# Altium footprint library PCB1.PcbLib: 48 footprints (part 2 of 3)
Each footprint in its own frame and in the unit in brackets; x right, y up, seen from the top. Pads: shape width x height; smd on the part's side, far side on the other; paste and mask are expansions set on the pad; w line width, h text height; cw(c..) or ccw(c..) is an arc to the next point about the centre after c.
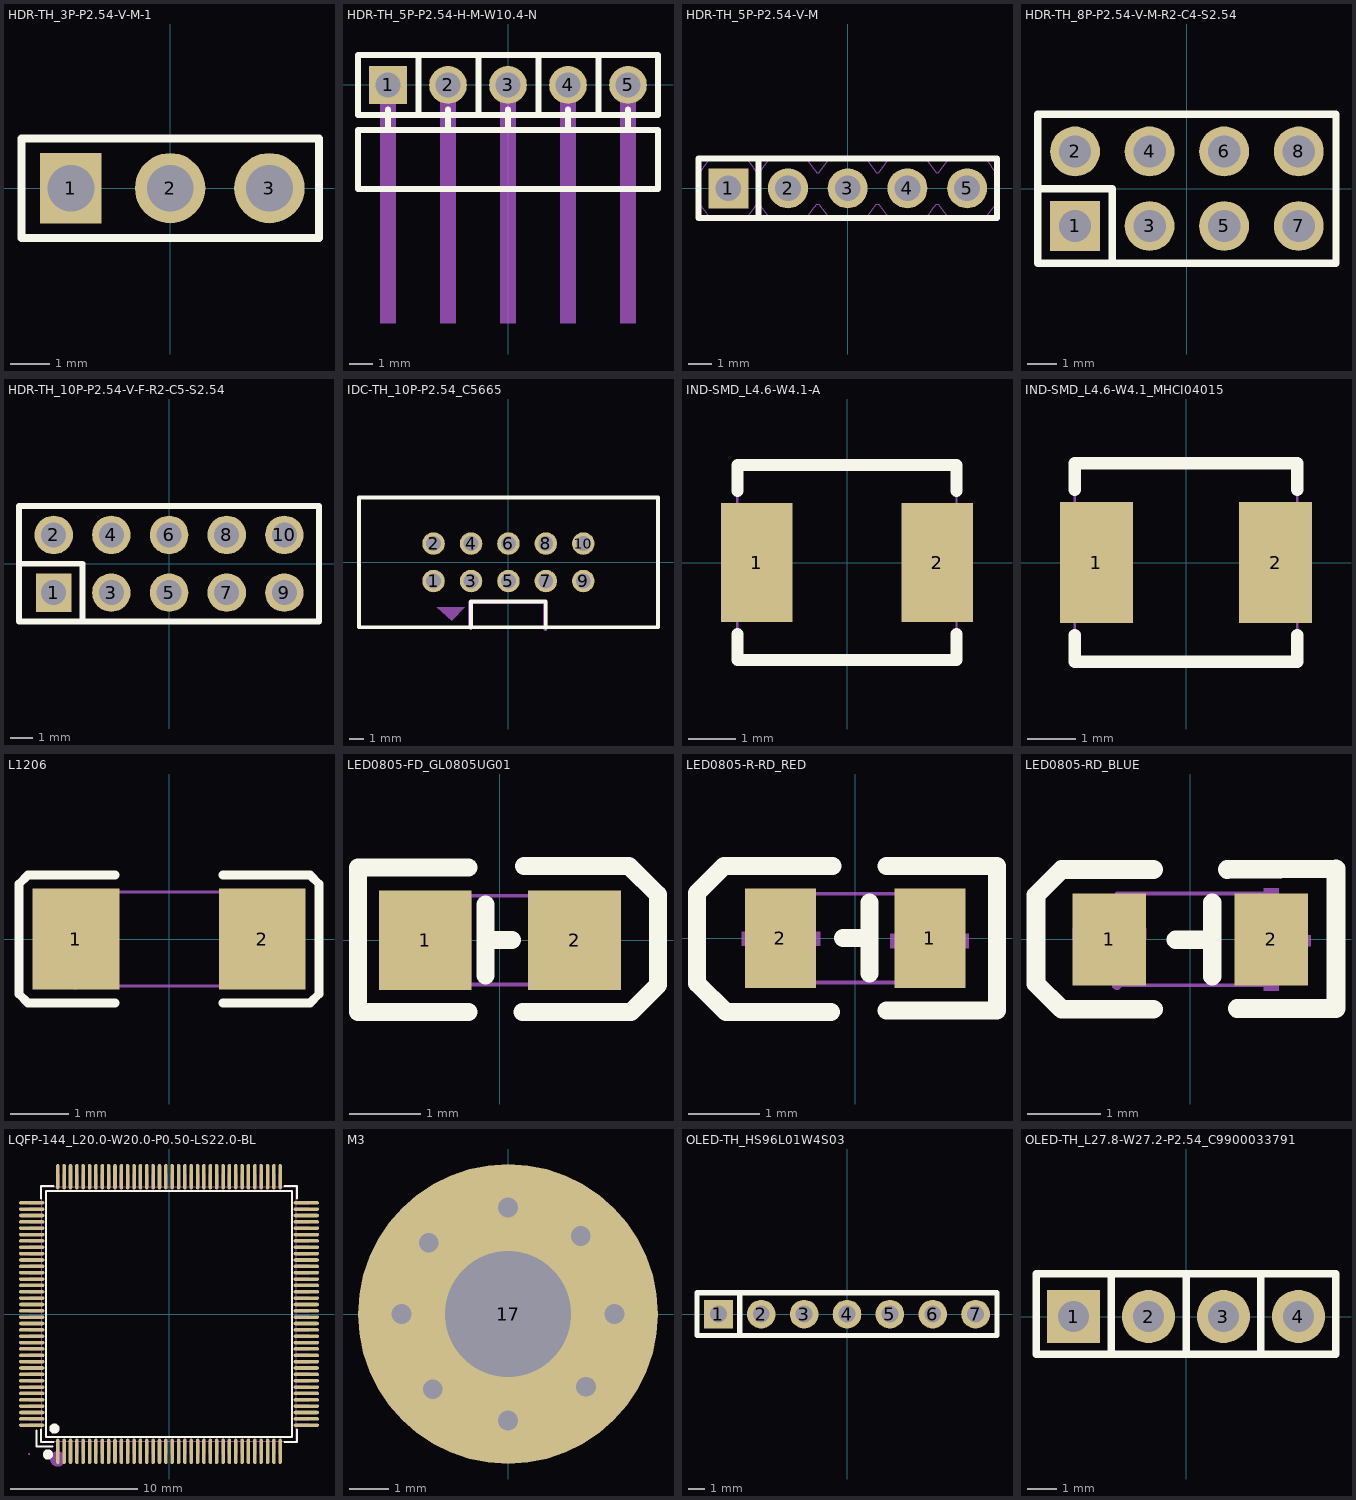
[diagram p1: the footprints below, top view; thin cyan lines are the x and y axes]

## HDR-TH_3P-P2.54-V-M-1 [mil]
pads (3):
  rect 62x70.9 hole 47.2: 1(-100,0)
  round 70.9 hole 47.2: 2(0,0) 3(100,0)
Top Overlay:
  lines w8: -150,-50 150,-50 150,50 -75,50 -150,50 -150,-50
Mechanical 7:
  lines w2: -150,-49.2 150,-49.2 150,49.3 -150,49.3 -150,-49.2
Mechanical 8:
  region: -147.6,-49.2 -147.6,-50.19 -149.01,-51.6 -150.99,-51.6 -152.4,-50.19 -152.4,-49.2 -152.4,-48.21 -150.99,-46.8 -149.01,-46.8 -147.6,-48.21 -147.6,-49.2
Mechanical 9:
  region: -112.6,12.6 -87.4,12.6 -87.4,-12.6 -112.6,-12.6
  region: -12.6,12.6 12.6,12.6 12.6,-12.6 -12.6,-12.6
  region: 87.4,12.6 112.6,12.6 112.6,-12.6 87.4,-12.6

## HDR-TH_5P-P2.54-H-M-W10.4-N [mil]
pads (5):
  rect 63x63 hole 41.3: 1(-200,0)
  round 63 hole 41.3: 2(-100,0) 3(0,0) 4(100,0) 5(200,0)
Top Overlay:
  lines w10: -199.6,-70.1 -199.6,-40.6 ; -149.1,-50 -149.1,50 ; -99.6,-70.1 -99.6,-40.6 ; -49.1,-50 -49.1,50 ; 0.4,-70.1 0.4,-40.6 ; 50.9,-50 50.9,50 ; 100.4,-70.1 100.4,-40.6 ; 150.9,-50 150.9,50 ; 200.4,-70.1 200.4,-40.6 ; -250,-173.2 -250,-74.8 250,-74.8 250,-173.2 -250,-173.2 ; -250,-50 -250,50 250,50 250,-50 -250,-50
Mechanical 6:
  region: -203.5,-176.4 -195.6,-176.4 -195.6,-396.8 -203.5,-396.8
  region: -103.5,-176.4 -95.6,-176.4 -95.6,-396.8 -103.5,-396.8
  region: -3.5,-176.4 4.4,-176.4 4.4,-396.8 -3.5,-396.8
  region: 96.5,-176.4 104.4,-176.4 104.4,-396.8 96.5,-396.8
  region: 196.5,-176.4 204.4,-176.4 204.4,-396.8 196.5,-396.8
Mechanical 9:
  region: -212.6,12.6 -187.4,12.6 -187.4,-12.6 -212.6,-12.6
  region: -112.6,12.6 -87.4,12.6 -87.4,-12.6 -112.6,-12.6
  region: -12.6,12.6 12.6,12.6 12.6,-12.6 -12.6,-12.6
  region: 87.4,12.6 112.6,12.6 112.6,-12.6 87.4,-12.6
  region: 187.4,12.6 212.6,12.6 212.6,-12.6 187.4,-12.6
Mechanical 10:
  region: -212.6,12.6 -187.4,12.6 -187.4,-396.8 -212.6,-396.8
  region: -112.6,12.6 -87.4,12.6 -87.4,-396.8 -112.6,-396.8
  region: -12.6,12.6 12.6,12.6 12.6,-396.8 -12.6,-396.8
  region: 87.4,12.6 112.6,12.6 112.6,-396.8 87.4,-396.8
  region: 187.4,12.6 212.6,12.6 212.6,-396.8 187.4,-396.8

## HDR-TH_5P-P2.54-V-M [mil]
pads (5):
  rect 66.9x66.9 hole 43.3: 1(-200,0)
  round 66.9 hole 43.3: 2(-100,0) 3(0,0) 4(100,0) 5(200,0)
Top Overlay:
  lines w10: -149.1,-50 -149.1,50 ; -250,-50 250,-50 250,50 -250,50 -250,-50
Mechanical 7:
  lines w2: -250,-26.3 -248.1,-26.3 -230.4,-49.9 -169.7,-49.9 -160.5,-38 -152,-26.3 -148.1,-26.3 -130.4,-50 -69.7,-50 -60.7,-38.2 -59.2,-36.1 -52,-26.3 -48.1,-26.3 -30.4,-49.9 30.3,-49.9 39,-38.5 40.1,-37 48,-26.3 51.9,-26.3 69.7,-50 130.3,-50 138.1,-39.7 139.5,-37.9 141,-35.9 148,-26.3 151.9,-26.3 169.6,-50 230.3,-50 239.1,-38.4 248,-26.3 250,-26.3 250,26.4 248,26.4 240.6,36.5 239.3,38.3 230.3,50.1 169.7,50 151.9,26.4 148,26.4 139.1,38.6 136.1,42.4 130.3,50 69.7,50 51.9,26.4 48,26.4 44.7,30.9 43.6,32.4 39.7,37.6 34.1,45 30.3,50 -30.3,50 -48.1,26.4 -52,26.4 -55.8,31.6 -56.6,32.6 -57.5,33.9 -60.9,38.5 -64.2,42.9 -69.7,50 -130.4,50 -148.1,26.4 -152,26.4 -158.2,34.8 -159.4,36.5 -163.4,41.7 -169.7,50 -230.3,50 -237.4,40.7 -248,26.4 -250,26.4 -250,-26.3
Mechanical 8:
  region: -247.6,-50 -247.6,-50.99 -249.01,-52.4 -250.99,-52.4 -252.4,-50.99 -252.4,-50 -252.4,-49.01 -250.99,-47.6 -249.01,-47.6 -247.6,-49.01 -247.6,-50 -247.7,-50
Mechanical 9:
  region: 187.4,12.6 212.6,12.6 212.6,-12.6 187.4,-12.6
  region: 87.4,12.6 112.6,12.6 112.6,-12.6 87.4,-12.6
  region: -12.6,12.6 12.6,12.6 12.6,-12.6 -12.6,-12.6
  region: -112.6,12.6 -87.4,12.6 -87.4,-12.6 -112.6,-12.6
  region: -212.6,12.6 -187.4,12.6 -187.4,-12.6 -212.6,-12.6

## HDR-TH_8P-P2.54-V-M-R2-C4-S2.54 [mil]
pads (8):
  rect 66.9x66.9 hole 43.3: 1(-150,-50)
  round 66.9 hole 43.3: 2(-150,50) 3(-50,-50) 4(-50,50) 5(50,-50) 6(50,50) 7(150,-50) 8(150,50)
Top Overlay:
  lines w10: -200,0 -100,0 -100,-100 ; 199.6,100 -200,100 -200,-100 200,-100 200,100
Mechanical 7:
  lines w2: -200,-98.4 200,-98.4 200,98.5 -200,98.5 -200,-98.4
Mechanical 8:
  region: -197.6,-98.4 -197.6,-99.39 -199.01,-100.8 -200.99,-100.8 -202.4,-99.39 -202.4,-98.4 -202.4,-97.41 -200.99,-96 -199.01,-96 -197.6,-97.41 -197.6,-98.4 -197.7,-98.4
Mechanical 9:
  region: -162.6,-37.4 -137.4,-37.4 -137.4,-62.6 -162.6,-62.6
  region: -162.6,62.6 -137.4,62.6 -137.4,37.4 -162.6,37.4
  region: -62.6,-37.4 -37.4,-37.4 -37.4,-62.6 -62.6,-62.6
  region: -62.6,62.6 -37.4,62.6 -37.4,37.4 -62.6,37.4
  region: 37.4,-37.4 62.6,-37.4 62.6,-62.6 37.4,-62.6
  region: 37.4,62.6 62.6,62.6 62.6,37.4 37.4,37.4
  region: 137.4,-37.4 162.6,-37.4 162.6,-62.6 137.4,-62.6
  region: 137.4,62.6 162.6,62.6 162.6,37.4 137.4,37.4

## HDR-TH_10P-P2.54-V-F-R2-C5-S2.54 [mil]
pads (10):
  rect 62x66.9 hole 43.3: 1(-200,-50)
  round 66.9 hole 43.3: 2(-200,50) 3(-100,-50) 4(-100,50) 5(0,-50) 6(0,50) 7(100,-50) 8(100,50) 9(200,-50) 10(200,50)
Top Overlay:
  lines w10: -260,-100 260,-100 260,100 -260,100 -260,-100 ; -260,-100 -150,-100 -150,0 -260,0 -260,-100
Mechanical 7:
  lines w2: -257.8,-98.4 -257.8,98.4 257.9,98.4 257.9,-98.4 -257.8,-98.4
Mechanical 8:
  region: -255.4,-98.4 -255.4,-99.39 -256.81,-100.8 -258.79,-100.8 -260.2,-99.39 -260.2,-98.4 -260.2,-97.41 -258.79,-96 -256.81,-96 -255.4,-97.41 -255.4,-98.4 -255.5,-98.4
Mechanical 9:
  region: -212.6,-57.9 -212.6,-42.1 -187.4,-42.1 -187.4,-57.9
  region: -212.6,57.9 -187.4,57.9 -187.4,42.1 -212.6,42.1
  region: -112.6,-42.1 -87.4,-42.1 -87.4,-57.9 -112.6,-57.9
  region: -112.6,57.9 -87.4,57.9 -87.4,42.1 -112.6,42.1
  region: -12.6,-42.1 12.6,-42.1 12.6,-57.9 -12.6,-57.9
  region: -12.6,57.9 12.6,57.9 12.6,42.1 -12.6,42.1
  region: 87.4,-42.1 112.6,-42.1 112.6,-57.9 87.4,-57.9
  region: 87.4,57.9 112.6,57.9 112.6,42.1 87.4,42.1
  region: 187.4,-42.1 212.6,-42.1 212.6,-57.9 187.4,-57.9
  region: 187.4,57.9 212.6,57.9 212.6,42.1 187.4,42.1

## IDC-TH_10P-P2.54_C5665 [mil]
pads (10):
  round 60 hole 39.4 paste-99999 mask+2: 1(-200,-50) 2(-200,50) 3(-100,-50) 4(-100,50) 5(0,-50) 6(0,50) 7(100,-50) 8(100,50) 9(200,-50) 10(200,50)
Top Overlay:
  lines w10: -98,-172 -100,-175 -100,-105 100,-105 100,-174 100,-172 ; -399.6,-173.2 -399.6,173.2 399.6,173.2 399.6,-173.2 -399.6,-173.2
Mechanical 6:
  region: -107.4,-173.2 -107.4,-106.3 -107.4,-105.31 -106.64,-103.47 -105.23,-102.06 -103.39,-101.3 -102.4,-101.3 98.4,-101.3 99.39,-101.3 101.23,-102.06 102.64,-103.47 103.4,-105.31 103.4,-106.3 103.4,-177.2 103.4,-179.27 100.47,-182.2 96.33,-182.2 93.4,-179.27 93.4,-177.2 93.4,-111.3 -97.4,-111.3 -97.4,-173.2 -97.4,-175.27 -100.33,-178.2 -104.47,-178.2 -107.4,-175.27 -107.4,-173.2
  region: -191,-120.1 -116.1,-120.1 -151.6,-155.5
Mechanical 7:
  lines w2: -399.6,-173.2 399.6,-173.2 399.6,173.2 -399.6,173.2 -399.6,-173.2
Mechanical 8:
  region: -397.2,-173.2 -397.2,-174.19 -398.61,-175.6 -400.59,-175.6 -402,-174.19 -402,-173.2 -402,-172.21 -400.59,-170.8 -398.61,-170.8 -397.2,-172.21 -397.2,-173.2
Mechanical 9:
  region: -212.6,-37.4 -187.4,-37.4 -187.4,-62.6 -212.6,-62.6
  region: -212.6,62.6 -187.4,62.6 -187.4,37.4 -212.6,37.4
  region: -112.6,-37.4 -87.4,-37.4 -87.4,-62.6 -112.6,-62.6
  region: -112.6,62.6 -87.4,62.6 -87.4,37.4 -112.6,37.4
  region: -12.6,-37.4 12.6,-37.4 12.6,-62.6 -12.6,-62.6
  region: -12.6,62.6 12.6,62.6 12.6,37.4 -12.6,37.4
  region: 87.4,-37.4 112.6,-37.4 112.6,-62.6 87.4,-62.6
  region: 87.4,62.6 112.6,62.6 112.6,37.4 87.4,37.4
  region: 187.4,-37.4 212.6,-37.4 212.6,-62.6 187.4,-62.6
  region: 187.4,62.6 212.6,62.6 212.6,37.4 187.4,37.4

## IND-SMD_L4.6-W4.1-A [mil]
pads (2):
  rect 59.1x98.4 smd: 1(-74.8,0) 2(74.8,0)
Top Overlay:
  lines w10: -90.6,-59.1 -90.6,-80.7 90.5,-80.7 90.5,-59.1 ; -90.6,59 -90.6,80.7 90.5,80.7 90.5,59.1
Mechanical 7:
  lines w2: -90.6,-80.7 90.5,-80.7 90.5,80.7 -90.6,80.7 -90.6,-80.7
Mechanical 8:
  region: -88.2,-80.7 -88.2,-81.69 -89.61,-83.1 -91.59,-83.1 -93,-81.69 -93,-80.7 -93,-79.71 -91.59,-78.3 -89.61,-78.3 -88.2,-79.71 -88.2,-80.7
Mechanical 9:
  region: 90.5,29.5 90.5,-29.5 51.2,-29.5 51.2,29.5
  region: -51.2,29.5 -51.2,-29.5 -90.6,-29.5 -90.6,29.5

## IND-SMD_L4.6-W4.1_MHCI04015 [mil]
pads (2):
  rect 59.1x98.4 smd: 1(-72.8,0) 2(72.8,0)
Top Overlay:
  lines w10: -90.5,-59 -90.5,-80.7 90.6,-80.7 90.6,-59 ; -90.5,59.1 -90.5,80.7 90.6,80.7 90.6,59.1
Mechanical 7:
  lines w2: -90.5,-80.7 90.6,-80.7 90.6,80.7 -90.5,80.7 -90.5,-80.7
Mechanical 8:
  region: -88.1,-80.7 -88.1,-81.69 -89.51,-83.1 -91.49,-83.1 -92.9,-81.69 -92.9,-80.7 -92.9,-79.71 -91.49,-78.3 -89.51,-78.3 -88.1,-79.71 -88.1,-80.7 -88.2,-80.7
Mechanical 9:
  region: -51.2,29.6 -51.2,-29.5 -90.5,-29.5 -90.5,29.6
  region: 90.6,29.6 90.6,-29.5 51.2,-29.5 51.2,29.6

## L1206 [mil]
pads (2):
  rect 58.5x68 smd paste-3937 mask+2: 1(-62.7,0) 2(62.7,0)
Top Overlay:
  lines w6: -36.5,-43 -95,-43 -101,-37 -101,37 -95,43 -36.5,43 ; 36.4,-43 94.9,-43 100.9,-37 100.9,37 94.9,43 36.4,43
Top Paste:
  region: -33.5,-30.1 -33.5,-15.5 -37.4,-11.6 -49.4,-11.6 -53.4,-7.6 -53.4,7.6 -49.4,11.5 -37.4,11.5 -33.5,15.5 -33.5,30.1 -37.4,34 -88,34 -92,30.1 -92,-30.1 -88,-34 -37.4,-34
  region: 33.4,-30.1 33.4,-15.5 37.4,-11.6 49.4,-11.6 53.3,-7.6 53.3,7.6 49.4,11.5 37.4,11.5 33.4,15.5 33.4,30.1 37.4,34 88,34 91.9,30.1 91.9,-30.1 88,-34 37.4,-34
Mechanical 7:
  lines w2: -63,-31.5 63,-31.5 63,31.5 -63,31.5 -63,-31.5
Mechanical 8:
  region: -60.6,-31.5 -60.6,-32.49 -62.01,-33.9 -63.99,-33.9 -65.4,-32.49 -65.4,-31.5 -65.4,-30.51 -63.99,-29.1 -62.01,-29.1 -60.6,-30.51 -60.6,-31.5 -60.7,-31.5
Mechanical 9:
  region: 63,-31.5 63,31.5 43.3,31.5 43.3,-31.5
  region: -63,-31.5 -63,31.5 -43.3,31.5 -43.3,-31.5

## LED0805-FD_GL0805UG01 [mil]
pads (2):
  rect 51.2x55.1 smd: 1(-41.4,0) 2(41.3,0)
Top Overlay:
  lines w10: -17.5,-39.9 -78.5,-39.9 -78.5,40.1 -17.5,40.1 ; -7.9,-19.7 -7.9,19.7 ; -4,0 6.6,0 ; 12.5,-39.9 72.5,-39.9 87.5,-24.9 87.5,25.1 71.5,41.1 13.5,41.1
Mechanical 6:
  region: 17.7,-6.7 17.7,5.1 65,5.1 65,-6.7
  region: -34.7,-23.6 -46.5,-23.6 -46.5,23.7 -34.7,23.7
  region: -65,-6.7 -65,5.1 -17.7,5.1 -17.7,-6.7
  region: 20,22.5 30,22.5 30,17.5 20,17.5
  region: 20,-22.5 20,-17.5 30,-17.5 30,-22.5
Mechanical 7:
  lines w2: -39.4,-24.6 -39.4,24.6 39.3,24.6 39.3,-24.6 -39.4,-24.6
Mechanical 8:
  region: -37,-24.6 -37,-25.59 -38.41,-27 -40.39,-27 -41.8,-25.59 -41.8,-24.6 -41.8,-23.61 -40.39,-22.2 -38.41,-22.2 -37,-23.61 -37,-24.6 -37.1,-24.6
Mechanical 9:
  region: -39.4,24.6 -15.8,24.6 -15.8,-24.6 -39.4,-24.6
  region: 15.7,24.6 39.3,24.6 39.3,-24.6 15.7,-24.6

## LED0805-R-RD_RED [mil]
pads (2):
  rect 39.4x55.1 smd: 1(41.4,0) 2(-41.3,0)
Top Overlay:
  lines w10: -13.5,-41 -71.5,-41 -87.5,-25 -87.5,25 -72.5,40 -12.5,40 ; -6.6,0 4,0 ; 7.9,-19.7 7.9,19.7 ; 17.5,-40 78.5,-40 78.5,40 17.5,40
Mechanical 6:
  region: -19.4,-4.3 -62.7,-4.3 -62.7,3.6 -19.4,3.6
  region: 19.5,2.4 62.8,2.4 62.8,-5.5 19.5,-5.5
  region: 37.1,-21.9 37.1,21.4 45,21.4 45,-21.9
Mechanical 7:
  lines w2: -39.3,-24.6 -39.3,24.6 39.4,24.6 39.4,-24.6 -39.3,-24.6
Mechanical 8:
  region: 41.8,24.6 41.8,23.61 40.39,22.2 38.41,22.2 37,23.61 37,24.6 37,25.59 38.41,27 40.39,27 41.8,25.59 41.8,24.6
Mechanical 9:
  region: -23.6,-24.6 -39.3,-24.6 -39.3,24.6 -23.6,24.6
  region: 39.4,-24.6 23.7,-24.6 23.7,24.6 39.4,24.6

## LED0805-RD_BLUE [mil]
pads (2):
  rect 39.4x49.2 smd: 1(-43.3,0) 2(43.3,0)
Top Overlay:
  lines w10: -19.7,-37.4 -68.9,-37.4 -82.6,-23.7 -82.6,23.6 -68.9,37.4 -19.7,37.4 ; -7.8,-0.2 11.8,-0.2 ; 11.8,-19.7 11.8,19.6 ; 19.7,37.4 78,37.8 78,-37 25.2,-37
Mechanical 6:
  region: -63,0 -23.6,0 -23.6,5.9 -63,5.9
  region: 25,-3.7 64.4,-3.7 64.4,2.2 25,2.2
  region: 39.4,27.5 47.3,27.5 47.3,-27.6 39.4,-27.6
Mechanical 7:
  lines w2: -39.3,-24.6 -39.3,24.6 39.4,24.6 39.4,-24.6 -39.3,-24.6
Mechanical 8:
  region: -36.9,-24.6 -36.9,-25.59 -38.31,-27 -40.29,-27 -41.7,-25.59 -41.7,-24.6 -41.7,-23.61 -40.29,-22.2 -38.31,-22.2 -36.9,-23.61 -36.9,-24.6 -37,-24.6
Mechanical 9:
  region: -25.6,-24.6 -39.3,-24.6 -39.3,24.6 -25.6,24.6
  region: 39.4,-24.6 25.6,-24.6 25.6,24.6 39.4,24.6

## LQFP-144_L20.0-W20.0-P0.50-LS22.0-BL [mil]
pads (144):
  oval 11x78.7 smd: 1(-344.5,-425.2) 2(-324.8,-425.2) 3(-305.1,-425.2) 4(-285.4,-425.2) 5(-265.7,-425.2) 6(-246,-425.2) 7(-226.3,-425.2) 8(-206.6,-425.2) 9(-187,-425.2) 10(-167.3,-425.2) 11(-147.6,-425.2) 12(-127.9,-425.2) 13(-108.2,-425.2) 14(-88.5,-425.2) 15(-68.9,-425.2) 16(-49.2,-425.2) 17(-29.5,-425.2) 18(-9.8,-425.2) 19(9.9,-425.2) 20(29.6,-425.2) 21(49.3,-425.2) 22(68.9,-425.2) 23(88.6,-425.2) 24(108.3,-425.2) 25(128,-425.2) 26(147.7,-425.2) 27(167.4,-425.2) 28(187,-425.2) 29(206.7,-425.2) 30(226.4,-425.2) 31(246.1,-425.2) 32(265.8,-425.2) 33(285.5,-425.2) 34(305.2,-425.2) 35(324.8,-425.2) 36(344.5,-425.2) 73(344.5,425.2) 74(324.8,425.2) 75(305.2,425.2) 76(285.5,425.2) 77(265.8,425.2) 78(246.1,425.2) 79(226.4,425.2) 80(206.7,425.2) 81(187,425.2) 82(167.4,425.2) 83(147.7,425.2) 84(128,425.2) 85(108.3,425.2) 86(88.6,425.2) 87(68.9,425.2) 88(49.3,425.2) 89(29.6,425.2) 90(9.9,425.2) 91(-9.8,425.2) 92(-29.5,425.2) 93(-49.2,425.2) 94(-68.9,425.2) 95(-88.5,425.2) 96(-108.2,425.2) 97(-127.9,425.2) 98(-147.6,425.2) 99(-167.3,425.2) 100(-187,425.2) 101(-206.6,425.2) 102(-226.3,425.2) 103(-246,425.2) 104(-265.7,425.2) 105(-285.4,425.2) 106(-305.1,425.2) 107(-324.8,425.2) 108(-344.5,425.2)
  oval 78.7x11 smd: 37(425.2,-344.5) 38(425.2,-324.8) 39(425.2,-305.1) 40(425.2,-285.4) 41(425.2,-265.8) 42(425.2,-246.1) 43(425.2,-226.4) 44(425.2,-206.7) 45(425.2,-187) 46(425.2,-167.3) 47(425.2,-147.6) 48(425.2,-128) 49(425.2,-108.3) 50(425.2,-88.6) 51(425.2,-68.9) 52(425.2,-49.2) 53(425.2,-29.5) 54(425.2,-9.8) 55(425.2,9.8) 56(425.2,29.5) 57(425.2,49.2) 58(425.2,68.9) 59(425.2,88.6) 60(425.2,108.3) 61(425.2,127.9) 62(425.2,147.6) 63(425.2,167.3) 64(425.2,187) 65(425.2,206.7) 66(425.2,226.4) 67(425.2,246.1) 68(425.2,265.7) 69(425.2,285.4) 70(425.2,305.1) 71(425.2,324.8) 72(425.2,344.5) 109(-425.2,344.5) 110(-425.2,324.8) 111(-425.2,305.1) 112(-425.2,285.4) 113(-425.2,265.7) 114(-425.2,246.1) 115(-425.2,226.4) 116(-425.2,206.7) 117(-425.2,187) 118(-425.2,167.3) 119(-425.2,147.6) 120(-425.2,127.9) 121(-425.2,108.3) 122(-425.2,88.6) 123(-425.2,68.9) 124(-425.2,49.2) 125(-425.2,29.5) 126(-425.2,9.8) 127(-425.2,-9.8) 128(-425.2,-29.5) 129(-425.2,-49.2) 130(-425.2,-68.9) 131(-425.2,-88.6) 132(-425.2,-108.3) 133(-425.2,-128) 134(-425.2,-147.6) 135(-425.2,-167.3) 136(-425.2,-187) 137(-425.2,-206.7) 138(-425.2,-226.4) 139(-425.2,-246.1) 140(-425.2,-265.8) 141(-425.2,-285.4) 142(-425.2,-305.1) 143(-425.2,-324.8) 144(-425.2,-344.5)
Top Overlay:
  circle w15.7: c-375,-435 r7.9
  circle w15.7: c-355,-355 r7.9
  lines w6: -410,-360 -410,-410 -360,-410 ; -396.7,-357.5 -396.7,-396.7 -357.5,-396.7 ; -396.7,357.5 -396.7,396.7 -357.5,396.7 ; 357.5,-396.7 396.7,-396.7 396.7,-357.5 ; 357.5,396.7 396.7,396.7 396.7,357.5 ; -380.7,-380.8 -380.7,380.8 380.8,380.8 380.8,-380.8 -380.7,-380.8
Mechanical 6:
  circle w23.6: c-344.5,-448.8 r11.8
Mechanical 7:
  lines w2: -393.7,-393.7 -393.7,393.7 393.7,393.7 393.7,-393.7 -393.7,-393.7
Mechanical 8:
  region: -430.6,-433.1 -430.6,-434.09 -432.01,-435.5 -433.99,-435.5 -435.4,-434.09 -435.4,-433.1 -435.4,-432.11 -433.99,-430.7 -432.01,-430.7 -430.6,-432.11 -430.6,-433.1 -430.7,-433.1
Mechanical 9:
  drawing of 144 lines, arcs and shapes, not listed
Mechanical 10:
  drawing of 144 lines, arcs and shapes, not listed

## M3 [mm]
pads (1):
  round 7.6 hole 3.2: 17(0,0)
via -2.007,1.806 diameter 0.6 hole 0.5
via -2.7,0 diameter 0.6 hole 0.5
via -1.909,-1.909 diameter 0.6 hole 0.5
via 0,-2.7 diameter 0.6 hole 0.5
via 1.976,-1.84 diameter 0.6 hole 0.5
via 2.7,0 diameter 0.6 hole 0.5
via 1.842,1.974 diameter 0.6 hole 0.5
via 0,2.7 diameter 0.6 hole 0.5

## OLED-TH_HS96L01W4S03 [mil]
pads (7):
  rect 66.9x66.9 hole 39.4: 1(-300,0)
  round 66.9 hole 39.4: 2(-200,0) 3(-100,0) 4(0,0) 5(100,0) 6(200,0) 7(300,0)
Top Overlay:
  lines w12.2: -250,-50 -250,50 ; 350,50 -350,50 -350,-50 350,-50 350,50.8
Mechanical 9:
  region: -312.6,12.6 -287.4,12.6 -287.4,-12.6 -312.6,-12.6
  region: -212.6,12.6 -187.4,12.6 -187.4,-12.6 -212.6,-12.6
  region: -112.6,12.6 -87.4,12.6 -87.4,-12.6 -112.6,-12.6
  region: -12.6,12.6 12.6,12.6 12.6,-12.6 -12.6,-12.6
  region: 87.4,12.6 112.6,12.6 112.6,-12.6 87.4,-12.6
  region: 187.4,12.6 212.6,12.6 212.6,-12.6 187.4,-12.6
  region: 287.4,12.6 312.6,12.6 312.6,-12.6 287.4,-12.6

## OLED-TH_L27.8-W27.2-P2.54_C9900033791 [mil]
pads (4):
  rect 70.9x70.9 hole 41.3 paste-99999 mask+2: 1(-150,0)
  round 70.9 hole 41.3 paste-99999 mask+2: 2(-50,0) 3(50,0) 4(150,0)
Top Overlay:
  lines w10: -100,-50 -100,56.7 ; 0,-50 0,56.7 ; 100,-50 100,56.7 ; -200,-50 200,-50 200,56.7 -200,56.7 -200,-50
Mechanical 9:
  region: -162.6,12.6 -137.4,12.6 -137.4,-12.6 -162.6,-12.6
  region: -62.6,12.6 -37.4,12.6 -37.4,-12.6 -62.6,-12.6
  region: 37.4,12.6 62.6,12.6 62.6,-12.6 37.4,-12.6
  region: 137.4,12.6 162.6,12.6 162.6,-12.6 137.4,-12.6